# Altium schematic symbol library TSX-3225_40.0000MF10Y-W6.SchLib: 1 symbol
Pins are listed as number, name and electrical type; pins without a type are passive.

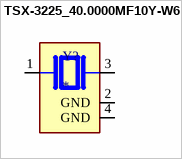
[diagram p0: symbol TSX-3225_40.0000MF10Y-W6]

## TSX-3225_40.0000MF10Y-W6
designator Y?
40 MHz Â±10ppm Crystal 12pF 40 Ohms 4-SMD, No Lead; MP: TSX-3225 40.0000MF10Y-W6; MF: EPSON; Check_prices: https://www.snapeda.com/parts/TSX-3225%2040.0000MF10Y-W6/EPSON/view-part/?ref=eda; Price: None; Purchase-URL: https://pricing.snapeda.com/search/part/TSX-3225 40.0000MF10Y-W6/?ref=eda; SnapEDA_Link: https://www.snapeda.com/parts/TSX-3225%2040.0000MF10Y-W6/EPSON/view-part/?ref=snap; Availability: In Stock; Package: NON STANDARD-4 EPSON; Value: *
footprint XTAL_TSX-3225_40.0000MF10Y-W6
pins: 1, 2 GND (power), 3 2, 4 GND (power)